# Altium schematic symbol library U.FL-R-SMT-1_10_.SchLib: 1 symbol
Pins are listed as number, name and electrical type; pins without a type are passive.

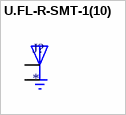
[diagram p0: symbol U.FL-R-SMT-1(10)]

## U.FL-R-SMT-1(10)
designator J?
U.FL Series 6 Ghz 50 Ohm Ultra-small SMT Coaxial Cable Receptacle; MP: U.FL-R-SMT-1(10); Availability: Unavailable; Value: *; Price: None; Package: None
footprint HRS_U.FL-R-SMT-1(10)
pins: 1 GND, 2 SIG, 3 GND